# Altium footprint library Connectors.PcbLib: 69 footprints (part 3 of 5)
Each footprint in its own frame and in the unit in brackets; x right, y up, seen from the top. Pads: shape width x height; smd on the part's side, far side on the other; paste and mask are expansions set on the pad; w line width, h text height; cw(c..) or ccw(c..) is an arc to the next point about the centre after c.
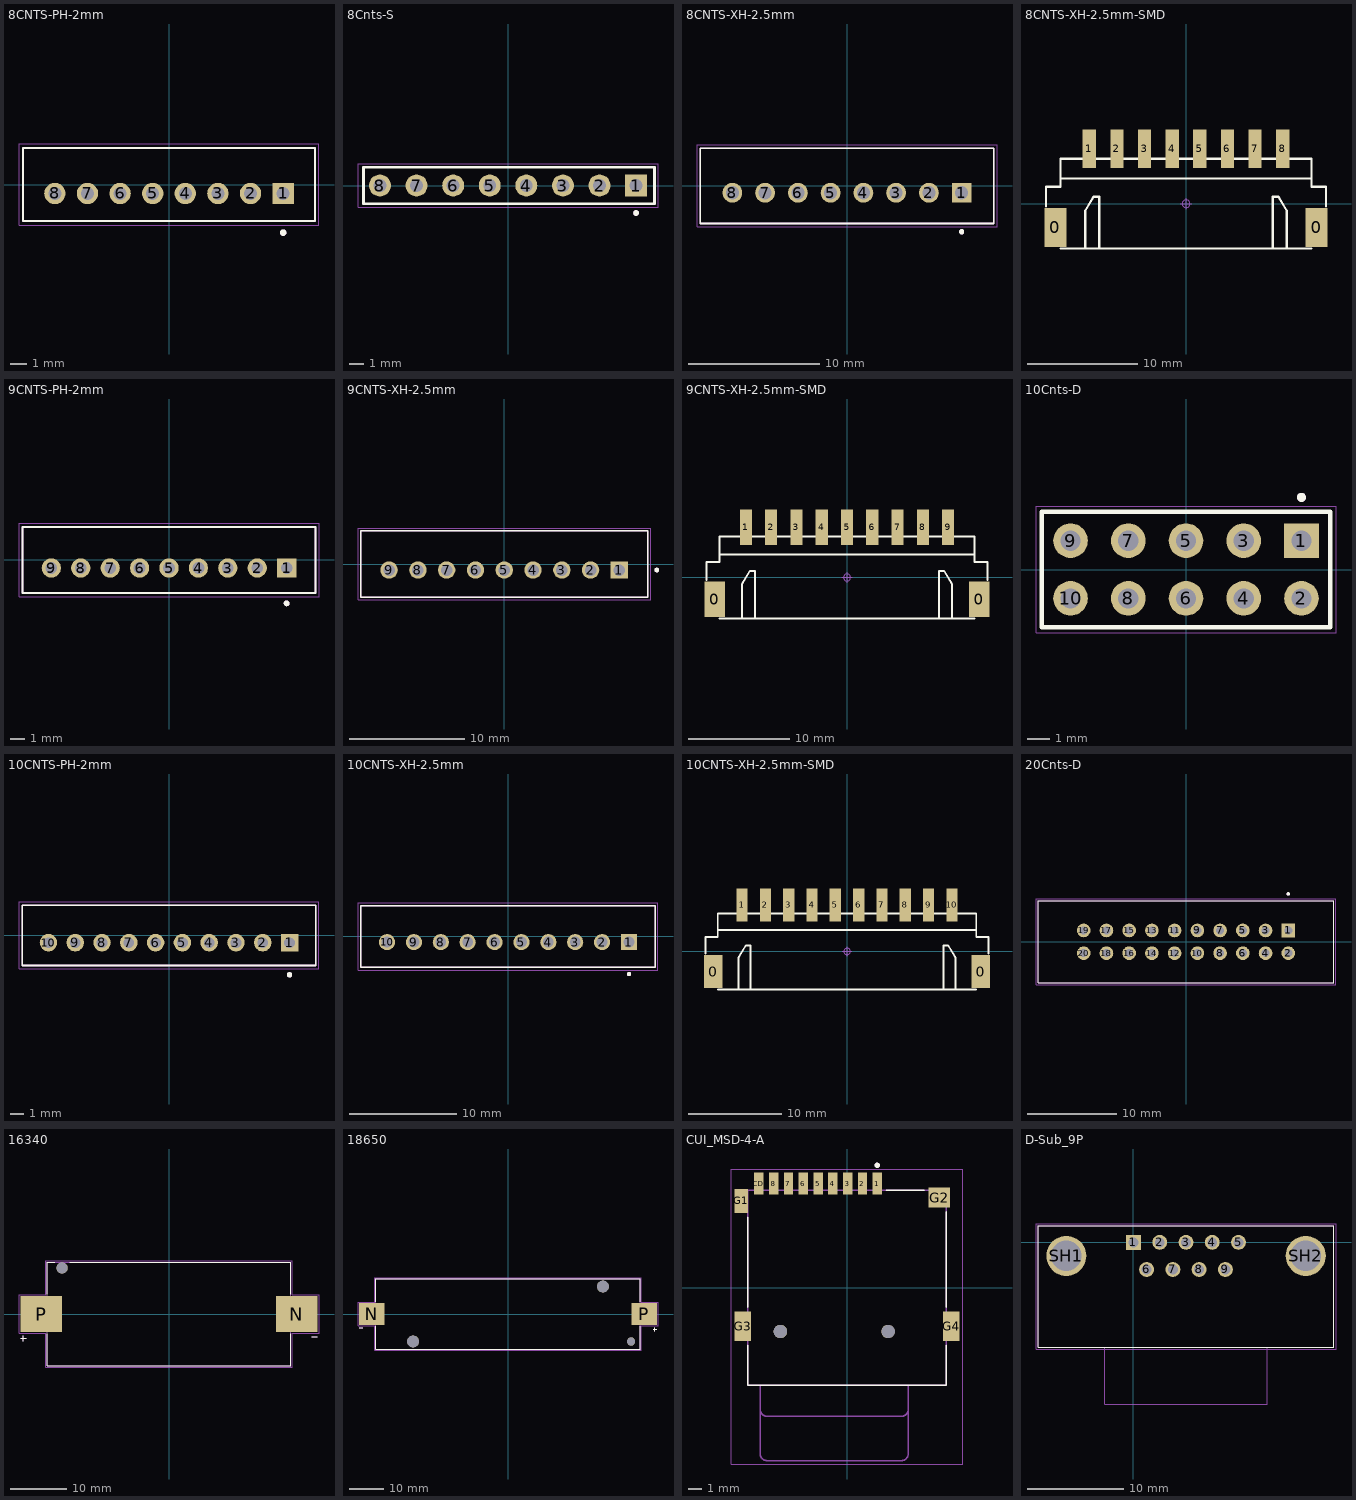
[diagram p2: the footprints below, top view; thin cyan lines are the x and y axes]

## 8CNTS-PH-2mm [mm] "JST_B2B-8CNTS-PH-2mm"
pads (8):
  rect 1.308x1.308 hole 0.8: 1(7,-0.55)
  round 1.308 hole 0.8: 2(5,-0.55) 3(3,-0.55) 4(1,-0.55) 5(-1,-0.55) 6(-3,-0.55) 7(-5,-0.55) 8(-7,-0.55)
Top Overlay:
  circle w0.2: c7,-2.95 r0.1
  lines w0.127: -8.95,-2.25 8.95,-2.25 8.95,2.25 -8.95,2.25 -8.95,-2.25
Mechanical 13:
  circle w0.2: c7,-2.95 r0.1
  lines w0.127: -8.95,-2.25 -8.95,2.25 8.95,2.25 8.95,-2.25 -8.95,-2.25
Mechanical 15:
  lines w0.05: -9.2,-2.5 -9.2,2.5 9.2,2.5 9.2,-2.5 -9.2,-2.5
3D body "step_temp.STEP": height 6.03, standoff -3.37, extent -8.95,-2.214 8.95,2.286

## 8Cnts-S [mil] "8Cnts-S"
pads (8):
  rect 60x60 hole 35: 1(350,0)
  round 60 hole 35: 2(250,0) 3(150,0) 4(50,0) 5(-50,0) 6(-150,0) 7(-250,0) 8(-350,0)
Top Overlay:
  circle w7.87: c350,-75 r3.94
  lines w7.87: -395,-50 400,-50 400,50 -395,50 -395,-50
Mechanical 13:
  circle w7.87: c350,-75 r3.94
  lines w3.94: -395,-50 400,-50 400,50 -395,50 -395,-50
Mechanical 15:
  lines w1.97: -410,-59.84 409.84,-59.84 409.84,59.84 -410,59.84 -410,-59.84
3D body "TSW-108-17-G-S.stp": height 720.98, standoff -109.02, extent -400,-50 405,50

## 8CNTS-XH-2.5mm [mm] "JST_B2B-8CNTS-XH-2.5mm"
height 7
pads (8):
  rect 1.508x1.508 hole 1: 1(8.75,-0.525)
  round 1.508 hole 1: 2(6.25,-0.525) 3(3.75,-0.525) 4(1.25,-0.525) 5(-1.25,-0.525) 6(-3.75,-0.525) 7(-6.25,-0.525) 8(-8.75,-0.525)
Top Overlay:
  circle w0.2: c8.75,-3.5 r0.1
  lines w0.127: -11.2,-2.875 11.2,-2.875 11.2,2.875 -11.2,2.875 -11.2,-2.875
Mechanical 13:
  circle w0.2: c8.75,-3.5 r0.1
  lines w0.127: -11.2,-2.875 11.2,-2.875 11.2,2.875 -11.2,2.875 -11.2,-2.875
Mechanical 15:
  lines w0.05: -11.45,-3.125 11.45,-3.125 11.45,3.125 -11.45,3.125 -11.45,-3.125
3D body "step_temp.STEP": height 7.03, standoff -3.37, extent -11.2,-2.875 11.2,2.875

## 8CNTS-XH-2.5mm-SMD [mm] "8pin 2515connecor 2.54 mm pitch male smd"
pads (10):
  rect 2x3.5 smd: 0(-11.827,-2.15) 0(11.827,-2.15)
  rect 1.2x3.5 smd: 1(-8.75,4.981) 2(-6.25,4.981) 3(-3.75,4.981) 4(-1.25,4.981) 5(1.25,4.981) 6(3.75,4.981) 7(6.25,4.981) 8(8.75,4.981)
Top Overlay:
  lines w0.2: -12.66,-0.254 -12.66,1.536 -11.35,1.536 -11.35,4.064 11.35,4.064 11.35,1.536 12.66,1.536 12.66,-0.254 ; -11.35,-4.064 11.35,-4.064 ; -11.35,2.286 11.35,2.286 ; -9.12,-4.064 -9.12,-0.634 -8.358,0.636 -7.85,0.636 -7.85,-4.064 ; 7.85,-4.064 7.85,0.636 8.358,0.636 9.12,-0.634 9.12,-4.064
Mechanical 15:
  circle w0.05: c0,0 r0.35
  lines w0.05: -0.5,0 0.5,0 ; 0,-0.5 0,0.5
3D body "XH2.54-WS-8P.STEP": height 6.05, standoff -0.01, extent -12.5,-4 12.5,6.418

## 9CNTS-PH-2mm [mm] "JST_B2B-9CNTS-PH-2mm"
pads (9):
  rect 1.308x1.308 hole 0.8: 1(8,-0.55)
  round 1.308 hole 0.8: 2(6,-0.55) 3(4,-0.55) 4(2,-0.55) 5(0,-0.55) 6(-2,-0.55) 7(-4,-0.55) 8(-6,-0.55) 9(-8,-0.55)
Top Overlay:
  circle w0.2: c8,-2.95 r0.1
  lines w0.127: -9.95,-2.25 -9.95,2.25 9.95,2.25 9.95,-2.25 -9.95,-2.25
Mechanical 13:
  circle w0.2: c8,-2.95 r0.1
  lines w0.127: -9.95,-2.25 9.95,-2.25 9.95,2.25 -9.95,2.25 -9.95,-2.25
Mechanical 15:
  lines w0.05: -10.2,-2.5 10.2,-2.5 10.2,2.5 -10.2,2.5 -10.2,-2.5
3D body "step_temp.STEP": height 6.03, standoff -3.37, extent -9.95,-2.25 9.95,2.25

## 9CNTS-XH-2.5mm [mm] "JST_B2B-9CNTS-XH-2.5mm"
height 7
pads (9):
  rect 1.508x1.508 hole 1: 1(10,-0.525)
  round 1.508 hole 1: 2(7.5,-0.525) 3(5,-0.525) 4(2.5,-0.525) 5(0,-0.525) 6(-2.5,-0.525) 7(-5,-0.525) 8(-7.5,-0.525) 9(-10,-0.525)
Top Overlay:
  circle w0.2: c13.25,-0.525 r0.1
  lines w0.127: -12.45,-2.875 12.45,-2.875 12.45,2.875 -12.45,2.875 -12.45,-2.875
Mechanical 13:
  circle w0.2: c13.25,-0.525 r0.1
  lines w0.127: -12.45,-2.875 12.45,-2.875 12.45,2.875 -12.45,2.875 -12.45,-2.875
Mechanical 15:
  lines w0.05: -12.7,-3.125 12.7,-3.125 12.7,3.125 -12.7,3.125 -12.7,-3.125
3D body "B9B-XH-A--3DModel-STEP-56544.STEP": height 7.03, standoff -3.37, extent -12.45,-2.875 12.45,2.875

## 9CNTS-XH-2.5mm-SMD [mm] "9pin 2515connecor 2.54 mm pitch male smd"
pads (11):
  rect 2x3.5 smd: 0(-13.077,-2.15) 0(13.077,-2.15)
  rect 1.2x3.5 smd: 1(-10,4.981) 2(-7.5,4.981) 3(-5,4.981) 4(-2.5,4.981) 5(0,4.981) 6(2.5,4.981) 7(5,4.981) 8(7.5,4.981) 9(10,4.981)
Top Overlay:
  lines w0.2: -13.91,-0.254 -13.91,1.536 -12.6,1.536 -12.6,4.064 12.6,4.064 12.6,1.536 13.91,1.536 13.91,-0.254 ; -12.6,-4.064 12.6,-4.064 ; -12.6,2.286 12.6,2.286 ; -10.37,-4.064 -10.37,-0.634 -9.608,0.636 -9.1,0.636 -9.1,-4.064 ; 9.1,-4.064 9.1,0.636 9.608,0.636 10.37,-0.634 10.37,-4.064
Mechanical 15:
  circle w0.05: c0,0 r0.35
  lines w0.05: -0.5,0 0.5,0 ; 0,-0.5 0,0.5
3D body "XH2.54-WS-9P.STEP": height 6.05, standoff -0.01, extent -13.75,-4 13.75,6.418

## 10Cnts-D [mil] "10Cnts-D"
pads (10):
  rect 60x60 hole 35: 1(200,50)
  round 60 hole 35: 2(200,-50) 3(100,50) 4(100,-50) 5(0,50) 6(0,-50) 7(-100,50) 8(-100,-50) 9(-200,50) 10(-200,-50)
Top Overlay:
  circle w7.87: c200,125 r3.94
  lines w7.87: -250,-100 250,-100 250,100 -250,100 -250,-100
Mechanical 13:
  circle w7.87: c200,125 r3.94
  lines w3.94: -250,-100 -250,100 ; -250,-100 250,-100 ; -250,-100 -250,100 ; -250,-100 250,-100 ; -250,100 250,100 ; 250,-100 250,100 ; 250,-100 250,100
Mechanical 15:
  lines w1.97: -259.84,-109.84 -259.84,109.84 259.84,109.84 259.84,-109.84 -259.84,-109.84
3D body "10Cnts-D.step": height 337.2, standoff -77.76, extent -250,-98.43 250,98.43

## 10CNTS-PH-2mm [mm] "JST_B2B-10CNTS-PH-2mm"
pads (10):
  rect 1.308x1.308 hole 0.8: 1(9,-0.55)
  round 1.308 hole 0.8: 2(7,-0.55) 3(5,-0.55) 4(3,-0.55) 5(1,-0.55) 6(-1,-0.55) 7(-3,-0.55) 8(-5,-0.55) 9(-7,-0.55) 10(-9,-0.55)
Top Overlay:
  circle w0.2: c9,-2.95 r0.1
  lines w0.127: -10.95,-2.25 10.95,-2.25 10.95,2.25 -10.95,2.25 -10.95,-2.25
Mechanical 13:
  circle w0.2: c9,-2.95 r0.1
  lines w0.127: -10.95,-2.25 -10.95,2.25 10.95,2.25 10.95,-2.25 -10.95,-2.25
Mechanical 15:
  lines w0.05: -11.2,-2.5 -11.2,2.5 11.2,2.5 11.2,-2.5 -11.2,-2.5
3D body "step_temp.STEP": height 6.03, standoff -3.37, extent -10.95,-2.25 10.95,2.25

## 10CNTS-XH-2.5mm [mm] "JST_B2B-10CNTS-XH-2.5mm"
height 7
pads (10):
  rect 1.508x1.508 hole 1: 1(11.25,-0.525)
  round 1.508 hole 1: 2(8.75,-0.525) 3(6.25,-0.525) 4(3.75,-0.525) 5(1.25,-0.525) 6(-1.25,-0.525) 7(-3.75,-0.525) 8(-6.25,-0.525) 9(-8.75,-0.525) 10(-11.25,-0.525)
Top Overlay:
  circle w0.2: c11.25,-3.5 r0.1
  lines w0.127: -13.7,-2.875 13.7,-2.875 13.7,2.875 -13.7,2.875 -13.7,-2.875
Mechanical 13:
  circle w0.2: c11.25,-3.5 r0.1
  lines w0.127: -13.7,-2.875 13.7,-2.875 13.7,2.875 -13.7,2.875 -13.7,-2.875
Mechanical 15:
  lines w0.05: -13.95,-3.125 13.95,-3.125 13.95,3.125 -13.95,3.125 -13.95,-3.125
3D body "step_temp.STEP": height 7.03, standoff -3.37, extent -13.7,-2.875 13.7,2.875

## 10CNTS-XH-2.5mm-SMD [mm] "10pin 2515connecor 2.54 mm pitch male smd"
pads (12):
  rect 2x3.5 smd: 0(-14.327,-2.15) 0(14.327,-2.15)
  rect 1.2x3.5 smd: 1(-11.25,4.981) 2(-8.75,4.981) 3(-6.25,4.981) 4(-3.75,4.981) 5(-1.25,4.981) 6(1.25,4.981) 7(3.75,4.981) 8(6.25,4.981) 9(8.75,4.981) 10(11.25,4.981)
Top Overlay:
  lines w0.2: -15.16,-0.254 -15.16,1.536 -13.85,1.536 -13.85,4.064 13.85,4.064 13.85,1.536 15.16,1.536 15.16,-0.254 ; -13.85,-4.064 13.85,-4.064 ; -13.85,2.286 13.85,2.286 ; -11.62,-4.064 -11.62,-0.634 -10.858,0.636 -10.35,0.636 -10.35,-4.064 ; 10.35,-4.064 10.35,0.636 10.858,0.636 11.62,-0.634 11.62,-4.064
Mechanical 15:
  circle w0.05: c0,0 r0.35
  lines w0.05: -0.5,0 0.5,0 ; 0,-0.5 0,0.5
3D body "XH2.54-WS-10P.STEP": height 6.05, standoff -0.01, extent -15,-4 15,6.418

## 20Cnts-D [mil]
pads (20):
  rect 60x60 hole 35: 1(450,50)
  round 60 hole 35: 2(450,-50) 3(350,50) 4(350,-50) 5(250,50) 6(250,-50) 7(150,50) 8(150,-50) 9(50,50) 10(50,-50) 11(-50,50) 12(-50,-50) 13(-150,50) 14(-150,-50) 15(-250,50) 16(-250,-50) 17(-350,50) 18(-350,-50) 19(-450,50) 20(-450,-50)
Top Overlay:
  circle w7.87: c450,210.63 r3.94
  lines w5: -650,-180 650,-180 650,180 -650,180 -650,-180
Mechanical 13:
  circle w7.87: c450,210.63 r3.94
  lines w5: -650,-180 650,-180 650,180 -650,180 -650,-180
Mechanical 15:
  lines w1.97: -659.84,-189.84 659.84,-189.84 659.84,189.84 -659.84,189.84 -659.84,-189.84
3D body "20Cnts-D.stp": height 389, standoff -119, extent -650,-180 650,180

## 16340 [mm] "CR123A"
height 15.48
pads (3):
  rect 7.34x6.35 smd: N(22.515,0) P(-22.515,0)
  round 1.98 hole 1.98 unplated: ""(-18.845,8.1)
Top Overlay:
  lines w0.127: -26.16,-4.29 -25.16,-4.29 ; -25.66,-4.79 -25.66,-3.79 ; -21.465,-3.49 -21.465,-9.145 21.465,-9.145 21.465,-3.49 ; -21.465,3.49 -21.465,9.145 -20.16,9.145 ; -17.53,9.145 21.465,9.145 21.465,3.49 ; 25.16,-4.04 26.16,-4.04
Mechanical 13:
  lines w0.127: -26.16,-4.29 -25.16,-4.29 ; -25.66,-4.79 -25.66,-3.79 ; 25.16,-4.04 26.16,-4.04 ; -21.465,-9.145 -21.465,9.145 21.465,9.145 21.465,-9.145 -21.465,-9.145
Mechanical 15:
  lines w0.05: -26.435,-3.425 -21.715,-3.425 -21.715,-9.395 21.715,-9.395 21.715,-3.425 26.435,-3.425 26.435,3.425 21.715,3.425 21.715,9.395 -21.715,9.395 -21.715,3.425 -26.435,3.425 -26.435,-3.425
3D body "step_temp.STEP": height 15.24, standoff -1.27, extent -26.187,-9.144 26.187,9.144

## 18650 [mm] "18650"
height 15.11
pads (5):
  rect 7.46x6.47 smd: N(-39.67,0) P(39.67,0)
  round 3.45 hole 3.45 unplated: ""(-27.6,-8) ""(27.6,8)
  round 2.39 hole 2.39 unplated: ""(35.82,-8)
Top Overlay:
  lines w0.127: -43.25,-4 -42.25,-4 ; -38.525,-3.55 -38.525,-10.325 38.525,-10.325 38.525,-3.55 ; -38.525,3.55 -38.525,10.325 38.525,10.325 38.525,3.55 ; 42.25,-4.5 43.25,-4.5 ; 42.75,-5 42.75,-4
Mechanical 13:
  lines w0.127: -43.25,-4 -42.25,-4 ; 42.25,-4.5 43.25,-4.5 ; 42.75,-5 42.75,-4 ; -38.525,-10.325 38.525,-10.325 38.525,10.325 -38.525,10.325 -38.525,-10.325
Mechanical 15:
  lines w0.05: -43.65,-3.485 -38.775,-3.485 -38.775,-10.575 38.775,-10.575 38.775,-3.485 43.65,-3.485 43.65,3.485 38.775,3.485 38.775,10.575 -38.775,10.575 -38.775,3.485 -43.65,3.485 -43.65,-3.485
3D body "step_temp.STEP": height 14.86, standoff -3.43, extent -43.231,-10.325 43.231,10.325

## CUI_MSD-4-A [mm] "GT-TF003-H0185-02"
height 2
pads (15):
  rect 0.7x1.6 smd: 1(2.25,7.75) 2(1.15,7.75) 3(0.05,7.75) 4(-1.05,7.75) 5(-2.15,7.75) 6(-3.25,7.75) 7(-4.35,7.75) 8(-5.45,7.75) CD(-6.55,7.75)
  rect 1x1.8 smd: G1(-7.877,6.45)
  rect 1.6x1.5 smd: G2(6.85,6.7)
  rect 1.2x2.2 smd: G3(-7.75,-2.85) G4(7.75,-2.85)
  round 1 hole 1 unplated: ""(-4.95,-3.25) ""(3.05,-3.25)
Top Overlay:
  circle w0.2: c2.25,9.1 r0.1
  lines w0.127: -7.375,-4.27 -7.375,-7.25 7.375,-7.25 7.375,-4.27 ; -7.375,-1.43 -7.375,5.23 ; 2.92,7.25 5.73,7.25 ; 7.375,-1.43 7.375,5.63
Mechanical 13:
  circle w0.2: c2.25,9.1 r0.1
  lines w0.127: -6.45,-9.05 ccw(c-5.95,-9.05) -5.95,-9.55 4.05,-9.55 ccw(c4.05,-9.05) 4.55,-9.05 ; -6.45,-7.25 -7.375,-7.25 -7.375,7.25 7.375,7.25 7.375,-7.25 4.55,-7.25 ; -6.45,-7.25 4.55,-7.25 ; -6.45,-7.25 -6.45,-12.35 ccw(c-5.95,-12.35) -5.95,-12.85 4.05,-12.85 ccw(c4.05,-12.35) 4.55,-12.35 4.55,-7.25
Mechanical 15:
  lines w0.05: -8.6,-13.1 8.6,-13.1 8.6,8.8 -8.6,8.8 -8.6,-13.1
3D body "step_temp.STEP": height 1.85, standoff -0.55, extent -8.075,-7.303 8.075,7.747

## D-Sub_9P [mm] "Connector D-Sub Standard PLUG FRNT MTLSHL 9P"
pads (11):
  rect 1.56x1.56 hole 1.04: 1(0,0)
  round 1.56 hole 1.04: 2(2.74,0) 3(5.48,0) 4(8.22,0) 5(10.96,0) 6(1.37,-2.84) 7(4.11,-2.84) 8(6.85,-2.84) 9(9.59,-2.84)
  round 4.186 hole 3.17: SH1(-7.01,-1.42) SH2(17.98,-1.42)
Top Overlay:
  lines w0.127: -9.925,-10.94 20.885,-10.94 20.885,1.71 -9.925,1.71 -9.925,-10.94
Mechanical 13:
  lines w0.127: -2.98,-10.96 -2.98,-16.93 13.94,-16.93 13.94,-10.96 ; -9.925,-10.94 20.885,-10.94 20.885,1.71 -9.925,1.71 -9.925,-10.94
Mechanical 15:
  lines w0.05: -10.175,-11.19 -10.175,1.96 21.135,1.96 21.135,-11.19 -10.175,-11.19
3D body "D-Sub_9P.stp": height 12.62, standoff -3.19, extent -10.058,-16.825 20.98,1.778